# Altium footprint library huan_basic.PcbLib: 138 footprints (part 4 of 9)
Each footprint in its own frame and in the unit in brackets; x right, y up, seen from the top. Pads: shape width x height; smd on the part's side, far side on the other; paste and mask are expansions set on the pad; w line width, h text height; cw(c..) or ccw(c..) is an arc to the next point about the centre after c.
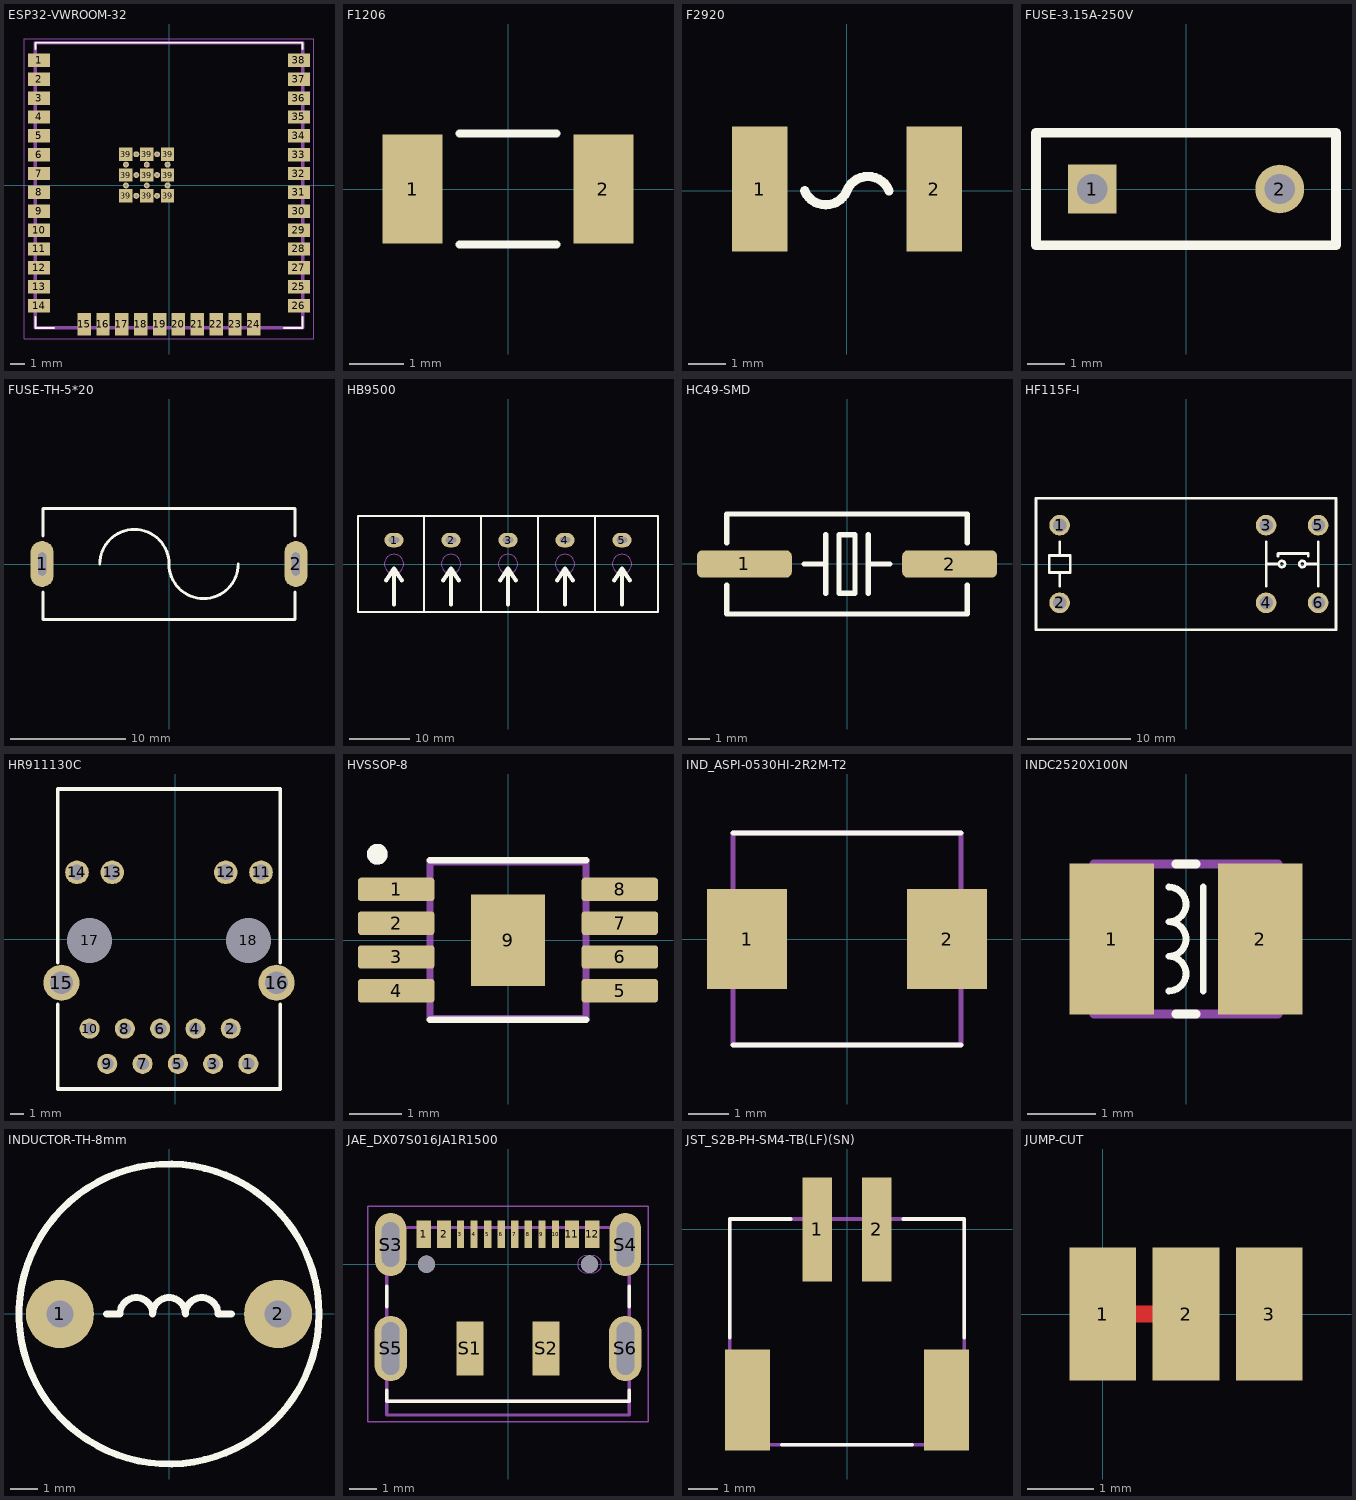
[diagram p3: the footprints below, top view; thin cyan lines are the x and y axes]

## ESP32-VWROOM-32 [mm]
height 3.35
pads (59):
  rect 1.5x0.9 smd: 1(-8.75,8.41) 2(-8.75,7.14) 3(-8.75,5.87) 4(-8.75,4.6) 5(-8.75,3.33) 6(-8.75,2.06) 7(-8.75,0.79) 8(-8.75,-0.48) 9(-8.75,-1.75) 10(-8.75,-3.02) 11(-8.75,-4.29) 12(-8.75,-5.56) 13(-8.75,-6.83) 14(-8.75,-8.1) 25(8.75,-6.83) 26(8.75,-8.1) 27(8.75,-5.56) 28(8.75,-4.29) 29(8.75,-3.02) 30(8.75,-1.75) 31(8.75,-0.48) 32(8.75,0.79) 33(8.75,2.06) 34(8.75,3.33) 35(8.75,4.6) 36(8.75,5.87) 37(8.75,7.14) 38(8.75,8.41)
  rect 0.9x1.5 smd: 15(-5.715,-9.35) 16(-4.445,-9.35) 17(-3.175,-9.35) 18(-1.905,-9.35) 19(-0.635,-9.35) 20(0.635,-9.35) 21(1.905,-9.35) 22(3.175,-9.35) 23(4.445,-9.35) 24(5.715,-9.35)
  rect 0.9x0.9 smd: 39(-2.9,-0.71) 39(-2.9,0.69) 39(-2.9,2.09) 39(-1.5,-0.71) 39(-1.5,0.69) 39(-1.5,2.09) 39(-0.1,-0.71) 39(-0.1,0.69) 39(-0.1,2.09)
  round 0.4 hole 0.2 mask+0: 39(-2.9,-0.01) 39(-2.9,1.39) 39(-2.2,-0.71) 39(-2.2,0.69) 39(-2.2,2.09) 39(-1.5,-0.01) 39(-1.5,1.39) 39(-0.8,-0.71) 39(-0.8,0.69) 39(-0.8,2.09) 39(-0.1,-0.01) 39(-0.1,1.39)
Top Overlay:
  lines w0.127: -9,-8.87 -9,-9.6 -7.755,-9.6 ; -9,9.18 -9,9.6 9,9.6 9,9.18 ; 7.755,-9.6 9,-9.6 9,-8.87
Mechanical 1:
  lines w0.254: -9,-9.6 -9,9.6 9,9.6 9,-9.6 -9,-9.6
Mechanical 15:
  lines w0.05: -9.75,-10.35 9.75,-10.35 9.75,9.85 -9.75,9.85 -9.75,-10.35
3D body "ESP32WROOM32UEN4--3DModel-STEP-269445.STEP": height 3.35, standoff 0, extent -9,-9.6 9,9.6

## F1206 [mm]
pads (2):
  rect 1.1x2 smd: 1(-1.75,0) 2(1.75,0)
Top Overlay:
  lines w0.15: -0.889,-1.016 0.889,-1.016 ; -0.889,1.016 0.889,1.016
3D body "fuse_silicon_1206L.step": height 0.5, standoff 0, extent -1.75,-0.92 1.75,0.92

## F2920 [mm]
pads (2):
  rect 1.5x3.4 smd: 1(-2.36,0.045) 2(2.37,0.045)
Top Overlay:
  lines w0.254: -1.143,0 ccw(c-0.572,0.233) 0,0 cw(c0.572,-0.233) 1.143,0
3D body "miniSMDC150F.STEP": height 0.48, standoff 0, extent -2.36,-1.66 2.37,1.75

## FUSE-3.15A-250V [mm]
pads (2):
  rect 1.3x1.3 hole 0.8: 1(-2.5,0)
  round 1.3 hole 0.8: 2(2.5,0)
Top Overlay:
  lines w0.254: -4,-1.5 4,-1.5 4,1.5 -4,1.5 -4,-1.5
3D body: height 8, standoff 0, extent -4,-1.5 4,1.5

## FUSE-TH-5*20 [mm]
pads (2):
  oval 2x4 hole 2 slot 0.7 at 0 deg: 1(-11,0) 2(11,0)
Top Overlay:
  lines w0.254: -10.922,-2.413 -10.922,-4.8 0,-4.8 10.922,-4.8 10.922,-2.413 ; -10.922,2.413 -10.922,4.8 0,4.8 10.922,4.8 10.922,2.413 ; -6,0 cw(c-3,0) 0,0 ccw(c3,0) 6,0
3D body "Fuse Holders SMD 5x20mm + Fuse.stp": height 12, standoff 0, extent -11.35,-4.8 11.35,4.8

## HB9500 [mm]
pads (5):
  oval 3.2x2.4 hole 0.9 slot 1.7 at 0 deg: 1(-19,3.988) 2(-9.5,3.988) 3(0,3.988) 4(9.5,3.988) 5(19,3.988)
Top Overlay:
  lines w0.32: -14,-8 -14,8 ; -4.5,-8 -4.5,8 ; 5,-8 5,8 ; 14.5,-8 14.5,8 ; -25,-8 -25,8 25,8 25,-8 -25,-8
  lines w0.7: -20.284,-2.717 -19,-0.756 ; -19,-6.756 -19,-0.756 ; -17.716,-2.717 -19,-0.756 ; -10.784,-2.717 -9.5,-0.756 ; -9.5,-6.756 -9.5,-0.756 ; -8.216,-2.717 -9.5,-0.756 ; -1.284,-2.717 0,-0.756 ; 0,-6.756 0,-0.756 ; 1.284,-2.717 0,-0.756 ; 8.216,-2.717 9.5,-0.756 ; 9.5,-6.756 9.5,-0.756 ; 10.784,-2.717 9.5,-0.756 ; 17.716,-2.717 19,-0.756 ; 19,-6.756 19,-0.756 ; 20.284,-2.717 19,-0.756
Mechanical 15:
  circle w0.2: c0,0 r1.6
  circle w0.2: c-9.5,0 r1.6
  circle w0.2: c-19,0 r1.6
  circle w0.2: c9.5,0 r1.6
  circle w0.2: c19,0 r1.6
3D body "HB9500.step": height 17.1, standoff -5.4, extent -25,-8 25,8

## HC49-SMD [mm]
pads (2):
  rrect40% 4.5x1.3 smd: 1(-4.873,0) 2(4.873,0)
Top Overlay:
  lines w0.254: -5.715,-1.016 -5.715,-2.375 5.715,-2.375 5.715,-1.016 ; -5.715,1.016 -5.715,2.375 5.715,2.375 5.715,1.016 ; -2.032,0 -1.016,0 ; -1.016,-1.397 -1.016,1.397 ; 1.016,-1.397 1.016,1.397 ; 1.016,0 2.032,0 ; -0.381,-1.397 -0.381,1.397 0,1.397 0.381,1.397 0.381,-1.397 0,-1.397 -0.381,-1.397
3D body "HC49_SMD.step": height 3.8, standoff 0.1, extent -6.5,-2.375 6.5,2.375

## HF115F-I [mm]
pads (6):
  round 2 hole 1.3: 1(-12.215,3.75) 2(-12.215,-3.75) 3(7.744,3.75) 4(7.744,-3.75) 5(12.774,3.75) 6(12.774,-3.75)
Top Overlay:
  circle w0.254: c9.271,0 r0.3
  circle w0.254: c11.246,0 r0.3
  lines w0.254: -12.192,-2.159 -12.192,-0.826 ; -12.192,0.826 -12.192,2.159 ; 7.747,-2.159 7.747,2.159 ; 7.747,0 8.89,0 ; 8.89,0.762 8.89,1.016 11.811,1.016 11.811,0.762 ; 11.627,0 12.77,0 ; 12.77,-2.159 12.77,2.159 ; -14.5,-6.35 -14.5,6.35 14.5,6.35 14.5,-6.35 -14.5,-6.35 ; -13.208,-0.826 -11.176,-0.826 -11.176,0.826 -13.208,0.826 -13.208,-0.826
3D body "HF115F-I.stp": height 15.8, standoff -2.4, extent -14.5,-6.35 14.5,6.35

## HR911130C [mm]
pads (18):
  round 1.446 hole 0.9: 1(5.265,-8.99) 2(3.995,-6.45) 3(2.725,-8.99) 4(1.455,-6.45) 5(0.185,-8.99) 6(-1.085,-6.45) 7(-2.355,-8.99) 8(-3.625,-6.45) 9(-4.895,-8.99) 10(-6.165,-6.45)
  round 1.7 hole 1.1: 11(6.175,4.8) 12(3.635,4.8) 13(-4.535,4.8) 14(-7.075,4.8)
  round 2.6 hole 1.65: 15(-8.195,-3.15) 16(7.295,-3.15)
  round 1.625 hole 3.25 unplated: 17(-6.165,-0.1) 18(5.265,-0.1)
Top Overlay:
  lines w0.254: -8.45,-4.7 -8.45,-10.8 7.55,-10.8 7.55,-4.7 ; -8.45,-1.7 -8.45,10.8 7.55,10.8 7.55,-1.7
3D body "HR911130C.stp": height 15.01, standoff -3.25, extent -9.447,-10.9 8.533,10.7

## HVSSOP-8 [mm]
pads (9):
  rrect25% 1.47x0.45 smd mask+0.06: 1(-2.15,0.975) 2(-2.15,0.325) 3(-2.15,-0.325) 4(-2.15,-0.975) 5(2.15,-0.975) 6(2.15,-0.325) 7(2.15,0.325) 8(2.15,0.975)
  rect 1.425x1.76 smd paste-2: 9(0,0)
Top Overlay:
  circle w0.2: c-2.513,1.651 r0.1
  lines w0.127: -1.5,-1.535 1.5,-1.535 ; -1.5,1.535 1.5,1.535
Top Paste:
  region: 0.356,-0.44 -0.356,-0.44 -0.356,0.44 0.356,0.44
Mechanical 13:
  circle w0.2: c-2.513,1.651 r0.1
  lines w0.127: -1.5,-1.5 1.5,-1.5 1.5,1.5 -1.5,1.5 -1.5,-1.5
3D body "step_temp.STEP": height 1.1, standoff 0, extent -2.45,-1.5 2.45,1.5

## IND_ASPI-0530HI-2R2M-T2 [mm]
height 3
pads (2):
  rect 2x2.5 smd: 1(-2.5,0) 2(2.5,0)
Top Overlay:
  lines w0.127: -2.85,-2.65 2.85,-2.65 ; -2.85,2.65 2.85,2.65
Mechanical 13:
  lines w0.127: -2.85,-2.65 -2.85,2.65 2.85,2.65 2.85,-2.65 -2.85,-2.65
3D body "step_temp.STEP": height 3, standoff 0, extent -2.8,-2.6 2.8,2.6

## INDC2520X100N [mm]
pads (2):
  rect 1.24x2.22 smd: 1(-1.09,0) 2(1.09,0)
Top Overlay:
  lines w0.1: -0.254,-0.762 ccw(c-0.254,-0.508) -0.254,-0.254 ccw(c-0.254,0) -0.254,0.254 ccw(c-0.254,0.508) -0.254,0.762 ; 0.254,-0.762 0.254,0.762
  lines w0.127: -0.15,-1.1 0.15,-1.1 ; -0.15,1.1 0.15,1.1
Mechanical 13:
  lines w0.127: -1.35,-1.1 1.35,-1.1 1.35,1.1 -1.35,1.1 -1.35,-1.1
3D body: height 0.8, standoff 0, extent -1.71,-1.1 1.71,1.11
3D body: height 0.81, standoff 0.1, extent -1.55,-0.2 -1.15,0.2

## INDUCTOR-TH-8mm [mm]
pads (2):
  round 2.5 hole 1: 1(-4,0) 2(4,0)
Top Overlay:
  circle w0.254: c0,0 r5.5
  lines w0.254: -2.286,0 -1.8,0 cw(c-1.2,0) -0.6,0 cw(c0,0) 0.6,0 cw(c1.2,0) 1.8,0 2.286,0
3D body "RLB1314_pitch9_vertical.stp": height 12, standoff -3, extent -5.85,-5.85 5.85,5.85

## JAE_DX07S016JA1R1500 [mm]
pads (21):
  rect 0.52x1 smd: 1(-3.1,1.1) 2(-2.35,1.1) 11(2.35,1.1) 12(3.1,1.1)
  rect 0.27x1 smd: 3(-1.75,1.1) 4(-1.25,1.1) 5(-0.75,1.1) 6(-0.25,1.1) 7(0.25,1.1) 8(0.75,1.1) 9(1.25,1.1) 10(1.75,1.1)
  rect 1x2 smd: S1(-1.4,-3.1) S2(1.4,-3.1)
  oval 1.158x2.316 hole 0.65 slot 1.65 at 90 deg: S3(-4.32,0.725) S4(4.32,0.725)
  oval 1.2x2.4 hole 0.65 slot 1.95 at 90 deg: S5(-4.32,-3.1) S6(4.32,-3.1)
  round 0.63 hole 0.63 unplated: ""(-3,0) ""(3,0)
  round 0.6 hole 0.6 unplated: ""(3,0)
Top Overlay:
  lines w0.127: -4.47,-4.63 -4.47,-5.05 4.47,-5.05 4.47,-4.63 ; -4.47,-1.57 -4.47,-0.805 ; 4.47,-1.57 4.47,-0.805
Mechanical 1:
  lines w0: 2.56,0 cw(c2.875,0) 2.875,0.315 3.125,0.315 cw(c3.125,0) 3.44,0 cw(c3.125,0) 3.125,-0.315 2.875,-0.315 cw(c2.875,0) 2.56,0
Mechanical 13:
  lines w0.127: -4.47,-5.05 4.47,-5.05 ; -4.47,-5.05 -4.47,1.35 4.47,1.35 4.47,-5.05 ; -4.47,-5.05 -4.47,-5.55 4.47,-5.55 4.47,-5.05
Mechanical 15:
  lines w0.05: -5.17,-5.8 5.17,-5.8 5.17,2.135 -5.17,2.135 -5.17,-5.8
3D body "DX07S016JA1R1500--3DModel-STEP-1.STEP": height 3.31, standoff -1.05, extent -4.47,-5.609 4.47,1.291

## JST_S2B-PH-SM4-TB(LF)(SN) [mm]
pads (4):
  rect 1x3.5 smd: 1(-1,0) 2(1,0)
  rect 1.5x3.4 smd: ""(-3.35,-5.75) ""(3.35,-5.75)
Top Overlay:
  lines w0.127: -3.95,-3.65 -3.95,0.35 -1.9,0.35 ; -2.2,-7.25 2.2,-7.25 ; 1.9,0.35 3.95,0.35 3.95,-3.65
Mechanical 13:
  lines w0.127: -3.95,-7.25 3.95,-7.25 3.95,0.35 -3.95,0.35 -3.95,-7.25
3D body "step_temp.STEP": height 5.5, standoff -0.1, extent -3.95,-7.239 3.95,1.361

## JUMP-CUT [mm]
pads (3):
  rect 1x2 smd: 1(0,0) 2(1.254,0) 3(2.508,0)
Top Layer:
  rectangle: 0,-0.127 1.27,0.127
Top Solder:
  rectangle: 0,-0.127 1.27,0.127
  rectangle: 0,-0.127 1.27,0.127